# EAGLE library part UWE-12_10-Q12PB-C (library UWE-12_10-Q12PB-C)
Isolated DC/DC Converters 120W 9-36Vin 12Vout Positive Logic w/BP Source: Datasheet <http://power.murata.com/data/power/uwe-100-120.pdf>
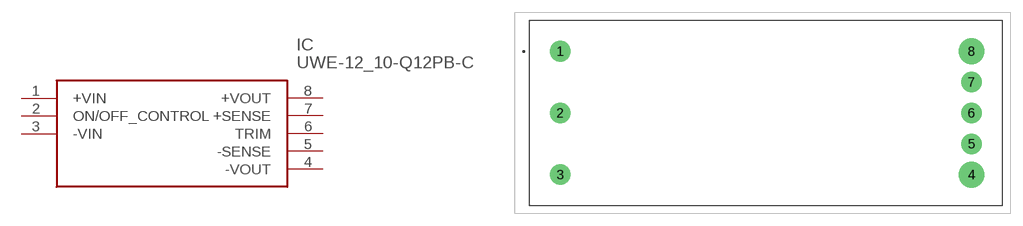
[diagram p0: symbol with the pads of UWE520Q48NC; footprint UWE520Q48NC]

Designator prefix IC

## UWE-12_10-Q12PB-C (Arrow_Part_Number: UWE-12/10-Q12PB-C; Arrow_Price-Stock: https://www.arrow.com/en/products/uwe-1210-q12pb-c/murata-power-solutions?utm_currency=USD&region=nac; Description: Isolated DC/DC Converters 120W 9-36Vin 12Vout Positive Logic w/BP; Height: 9mm; Manufacturer_Name: Murata Electronics; Manufacturer_Part_Number: UWE-12/10-Q12PB-C; Mouser_Part_Number: 580-UWE-12/10Q12PBC; Mouser_Price-Stock: https://www.mouser.co.uk/ProductDetail/Murata-Power-Solutions/UWE-12-10-Q12PB-C?qs=k9tXbTTLydF4I%2FLCpt6DNQ%3D%3D)  [UWE520Q48NC]
1  +VIN  in
2  ON/OFF_CONTROL
3  -VIN  in
4  -VOUT  out
5  -SENSE
6  TRIM
7  +SENSE
8  +VOUT  out

## Footprint UWE520Q48NC (pad centres in mm)
UWE_FFW
drill 1.575 pad 2.54: 1 -25.4,7.62; 2 -25.4,0; 3 -25.4,-7.62; 5 25.4,-3.81; 6 25.4,0; 7 25.4,3.81
drill 2.134 pad 3.2: 4 25.4,-7.62; 8 25.4,7.62